# Altium schematic symbol library Soc.SchLib: 1 symbol
Pins are listed as number, name and electrical type; pins without a type are passive.

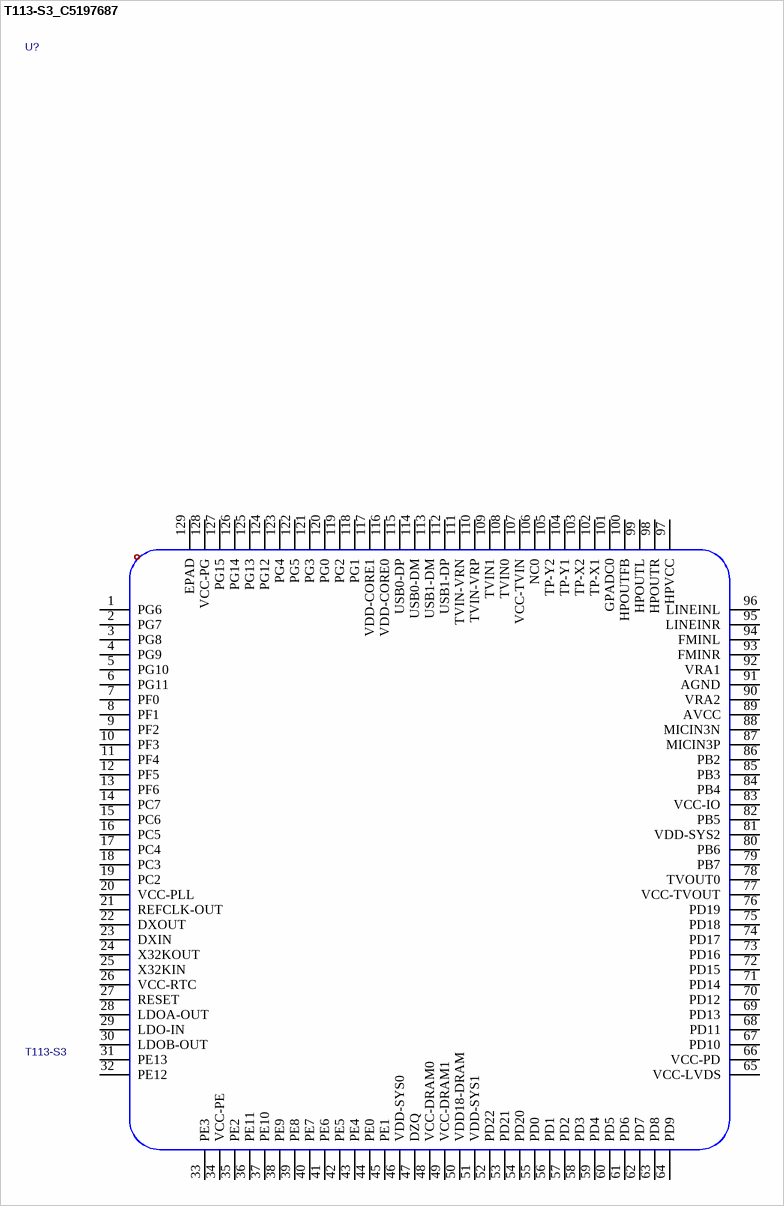
[diagram p0: symbol T113-S3_C5197687]

## T113-S3_C5197687
designator U?, comment T113-S3
嵌入式芯片，A SoC designed by Allwinner, CPU Arm A7 *2@1200MHz+, sip 128M DDR, rich audio and video interfaces, especially good at display; Manufacturer: Allwinner(全志); Symbol: T113-S3_C5197687; AddInBom: yes; ModelId: d93867f14b8b45cfada823fcdea505dd聨0819f05c4eef4c71ace90d822a990e87; ModelName: LQFP-128_L14.0-W14.0-P0.40-LS16.0-BL-EP5.6; ModelTransform: 629.92,629.92,0,0,0,0,0,0,0; Device: T113-S3_C5197687; FootprintName: LQFP-128_L14.0-W14.0-P0.40-LS16.0-BL-EP5.6; LCSC Part Name: Allwinner T113-S3; SupplierPart: C5197687; ManufacturerPart: T113-S3; Supplier Footprint: ELQFP-128; JLCPCB Part Class: Extended Part; Datasheet: https://item.szlcsc.com/datasheet/T113-S3/5881165.html; Supplier: LCSC; ConvertToPcb: yes; Features: 日历功能；真随机数发生器(TRNG)；看门狗复位；内置通用定时器；红外遥控；集成LDO
footprint LQFP-128_L14.0-W14.0-P0.40-LS16.0-BL-EP5.6
footprint LQFP-128_L14.0-W14.0-P0.40-LS16.0-BL-EP5.6
pins: 1 PG6, 2 PG7, 3 PG8, 4 PG9, 5 PG10, 6 PG11, 7 PF0, 8 PF1, 9 PF2, 10 PF3, 11 PF4, 12 PF5, 13 PF6, 14 PC7, 15 PC6, 16 PC5, 17 PC4, 18 PC3, 19 PC2, 20 VCC-PLL, 21 REFCLK-OUT, 22 DXOUT, 23 DXIN, 24 X32KOUT, 25 X32KIN, 26 VCC-RTC, 27 RESET, 28 LDOA-OUT, 29 LDO-IN, 30 LDOB-OUT, 31 PE13, 32 PE12, 33 PE3, 34 VCC-PE, 35 PE2, 36 PE11, 37 PE10, 38 PE9, 39 PE8, 40 PE7, 41 PE6, 42 PE5, 43 PE4, 44 PE0, 45 PE1, 46 VDD-SYS0, 47 DZQ, 48 VCC-DRAM0, 49 VCC-DRAM1, 50 VDD18-DRAM, 51 VDD-SYS1, 52 PD22, 53 PD21, 54 PD20, 55 PD0, 56 PD1, 57 PD2, 58 PD3, 59 PD4, 60 PD5, 61 PD6, 62 PD7, 63 PD8, 64 PD9, 65 VCC-LVDS, 66 VCC-PD, 67 PD10, 68 PD11, 69 PD13, 70 PD12, 71 PD14, 72 PD15, 73 PD16, 74 PD17, 75 PD18, 76 PD19, 77 VCC-TVOUT, 78 TVOUT0, 79 PB7, 80 PB6, 81 VDD-SYS2, 82 PB5, 83 VCC-IO, 84 PB4, 85 PB3, 86 PB2, 87 MICIN3P, 88 MICIN3N, 89 AVCC, 90 VRA2, 91 AGND, 92 VRA1, 93 FMINR, 94 FMINL, 95 LINEINR, 96 LINEINL, 97 HPVCC, 98 HPOUTR, 99 HPOUTL, 100 HPOUTFB, 101 GPADC0, 102 TP-X1, 103 TP-X2, 104 TP-Y1, 105 TP-Y2, 106 NC0, 107 VCC-TVIN, 108 TVIN0, 109 TVIN1, 110 TVIN-VRP, 111 TVIN-VRN, 112 USB1-DP, 113 USB1-DM, 114 USB0-DM, 115 USB0-DP, 116 VDD-CORE0, 117 VDD-CORE1, 118 PG1, 119 PG2, 120 PG0, 121 PG3, 122 PG5, 123 PG4, 124 PG12, 125 PG13, 126 PG14, 127 PG15, 128 VCC-PG, 129 EPAD